# Altium footprint library LCD.PcbLib: 34 footprints (part 2 of 3)
Each footprint in its own frame and in the unit in brackets; x right, y up, seen from the top. Pads: shape width x height; smd on the part's side, far side on the other; paste and mask are expansions set on the pad; w line width, h text height; cw(c..) or ccw(c..) is an arc to the next point about the centre after c.
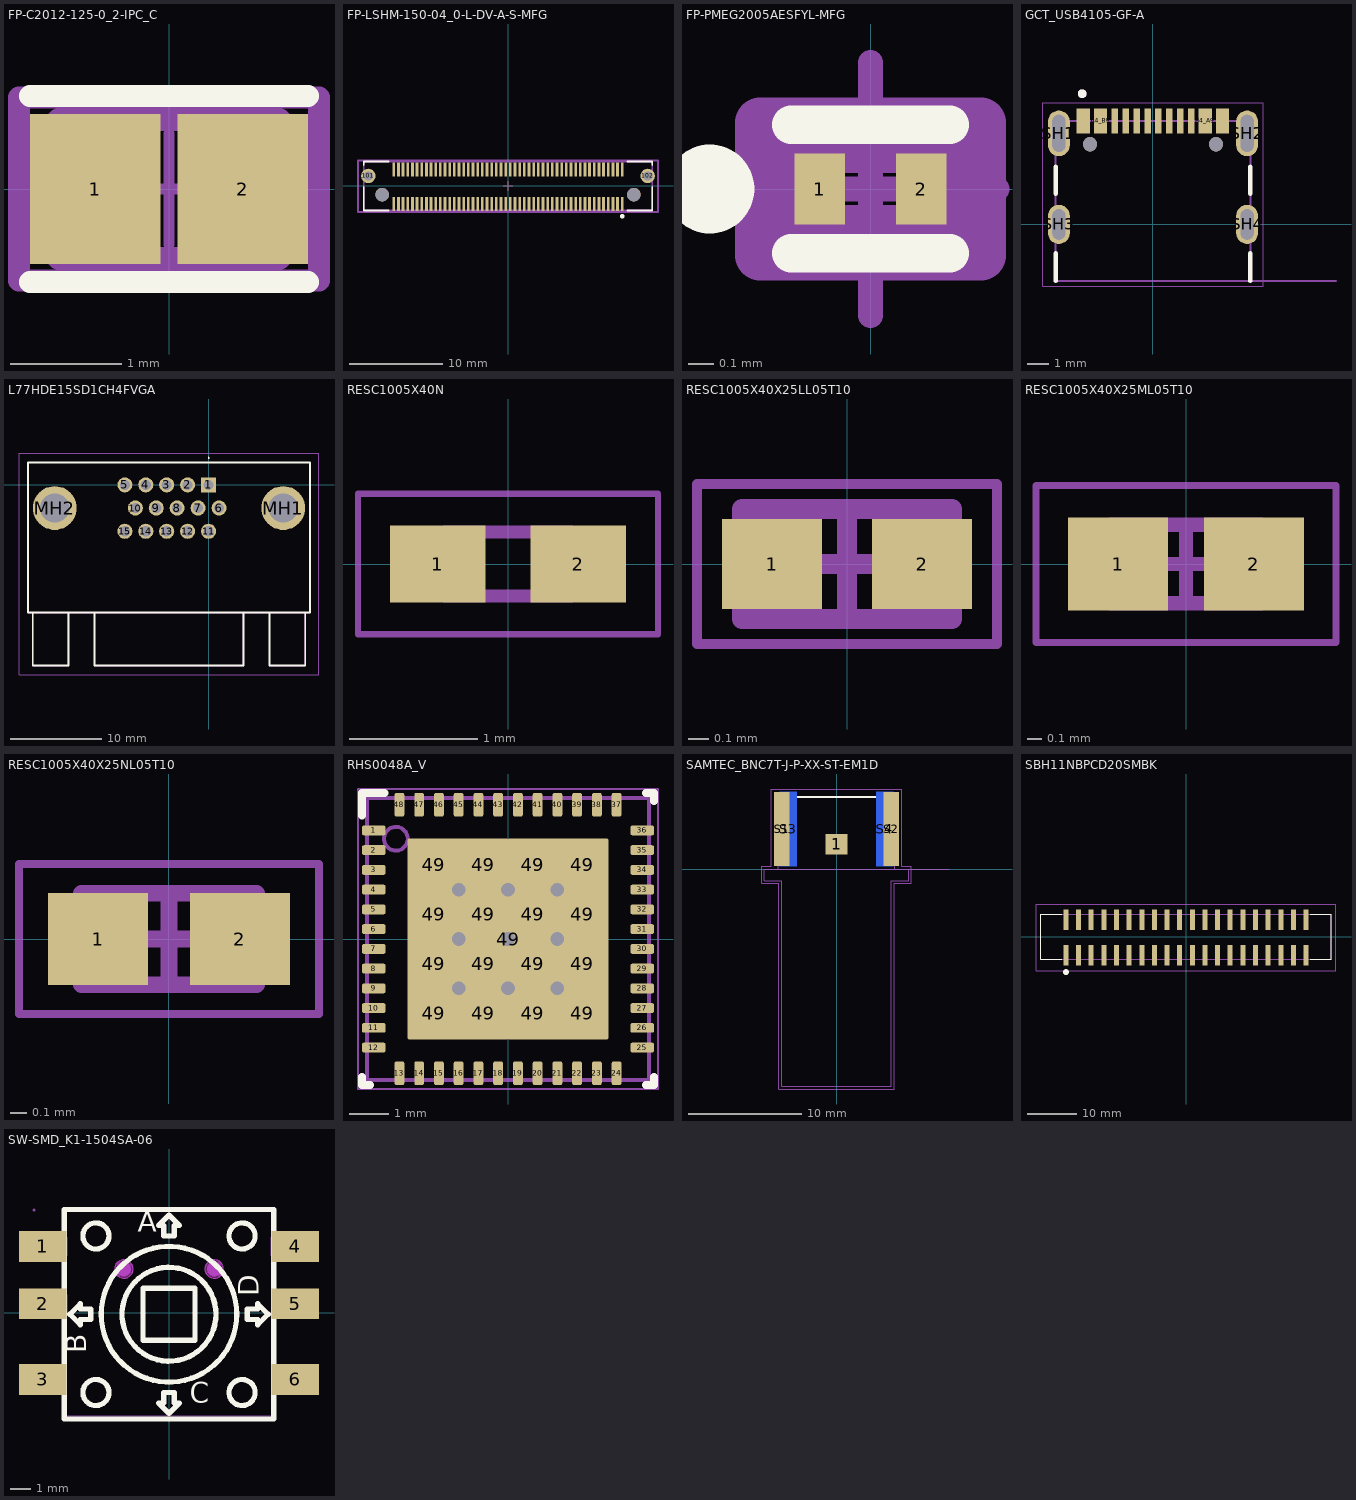
[diagram p1: the footprints below, top view; thin cyan lines are the x and y axes]

## FP-C2012-125-0_2-IPC_C [mm]
pads (2):
  rect 1.178x1.356 smd paste+0 mask+0: 1(-0.664,0) 2(0.664,0)
Top Overlay:
  lines w0.2: -1.253,-0.838 1.253,-0.838 ; -1.253,0.838 1.253,0.838
Top 3D Body:
  lines w0.2: -1,-0.625 1,-0.625 1,0.625 -1,0.625 -1,-0.625
Top Courtyard:
  lines w0.2: -1.353,-0.825 1.353,-0.825 1.353,0.825 -1.353,0.825 -1.353,-0.825
Top Assembly:
  lines w0.2: -1.353,-0.825 1.353,-0.825 1.353,0.825 -1.353,0.825 -1.353,-0.825
  text ".Designator" at 0,0.188 h1
Top Component Center:
  lines w0.1: -0.5,0 0.5,0 ; 0,-0.5 0,0.5
3D body "Cap_TDK_C2012X7R1E474K125AA_eec.STEP": height 0.25, standoff 0, extent -1.353,-0.825 1.353,0.825

## FP-LSHM-150-04_0-L-DV-A-S-MFG [mm]
pads (104):
  rect 0.3x1.5 smd paste+0 mask+0: 1(12.25,-1.925) 2(12.25,1.775) 3(11.75,-1.925) 4(11.75,1.775) 5(11.25,-1.925) 6(11.25,1.775) 7(10.75,-1.925) 8(10.75,1.775) 9(10.25,-1.925) 10(10.25,1.775) 11(9.75,-1.925) 12(9.75,1.775) 13(9.25,-1.925) 14(9.25,1.775) 15(8.75,-1.925) 16(8.75,1.775) 17(8.25,-1.925) 18(8.25,1.775) 19(7.75,-1.925) 20(7.75,1.775) 21(7.25,-1.925) 22(7.25,1.775) 23(6.75,-1.925) 24(6.75,1.775) 25(6.25,-1.925) 26(6.25,1.775) 27(5.75,-1.925) 28(5.75,1.775) 29(5.25,-1.925) 30(5.25,1.775) 31(4.75,-1.925) 32(4.75,1.775) 33(4.25,-1.925) 34(4.25,1.775) 35(3.75,-1.925) 36(3.75,1.775) 37(3.25,-1.925) 38(3.25,1.775) 39(2.75,-1.925) 40(2.75,1.775) 41(2.25,-1.925) 42(2.25,1.775) 43(1.75,-1.925) 44(1.75,1.775) 45(1.25,-1.925) 46(1.25,1.775) 47(0.75,-1.925) 48(0.75,1.775) 49(0.25,-1.925) 50(0.25,1.775) 51(-0.25,-1.925) 52(-0.25,1.775) 53(-0.75,-1.925) 54(-0.75,1.775) 55(-1.25,-1.925) 56(-1.25,1.775) 57(-1.75,-1.925) 58(-1.75,1.775) 59(-2.25,-1.925) 60(-2.25,1.775) 61(-2.75,-1.925) 62(-2.75,1.775) 63(-3.25,-1.925) 64(-3.25,1.775) 65(-3.75,-1.925) 66(-3.75,1.775) 67(-4.25,-1.925) 68(-4.25,1.775) 69(-4.75,-1.925) 70(-4.75,1.775) 71(-5.25,-1.925) 72(-5.25,1.775) 73(-5.75,-1.925) 74(-5.75,1.775) 75(-6.25,-1.925) 76(-6.25,1.775) 77(-6.75,-1.925) 78(-6.75,1.775) 79(-7.25,-1.925) 80(-7.25,1.775) 81(-7.75,-1.925) 82(-7.75,1.775) 83(-8.25,-1.925) 84(-8.25,1.775) 85(-8.75,-1.925) 86(-8.75,1.775) 87(-9.25,-1.925) 88(-9.25,1.775) 89(-9.75,-1.925) 90(-9.75,1.775) 91(-10.25,-1.925) 92(-10.25,1.775) 93(-10.75,-1.925) 94(-10.75,1.775) 95(-11.25,-1.925) 96(-11.25,1.775) 97(-11.75,-1.925) 98(-11.75,1.775) 99(-12.25,-1.925) 100(-12.25,1.775)
  round 1.55 hole 1 paste-2539.97 mask+0: 101(-14.975,1.075) 102(14.975,1.075)
  round 1.45 hole 1.45 unplated paste-2539.97 mask+0: ""(-13.5,-0.925) ""(13.5,-0.925)
Top Overlay:
  circle w0.25: c12.25,-3.25 r0.125
  lines w0.2: -15.465,-0.075 -15.465,-2.63 -12.775,-2.63 ; -15.465,2.225 -15.465,2.63 -12.775,2.63 ; 12.775,-2.63 15.465,-2.63 15.465,-0.075 ; 12.775,2.63 15.465,2.63 15.465,2.225
Top Paste:
  circle w1: c14.975,1.075 r0.5
  circle w1: c-14.975,1.075 r0.5
Top 3D Body:
  lines w0.2: -15.465,-2.63 15.465,-2.63 15.465,2.63 -15.465,2.63 -15.465,-2.63
Top Courtyard:
  lines w0.2: -16.075,-2.775 16.075,-2.775 16.075,2.73 -16.075,2.73 -16.075,-2.775
Top Assembly:
  lines w0.2: -16.075,-2.775 16.075,-2.775 16.075,2.73 -16.075,2.73 -16.075,-2.775
  text ".Designator" at 0.482,1.112 h1
Top Component Center:
  lines w0.1: -0.5,0 0.5,0 ; 0,-0.5 0,0.5
3D body "Conn_Samtec_LSHM-150-04_0-L-DV-A-S-K-TR_eec.STEP": height 0.25, standoff 0, extent -16.075,-2.775 16.075,2.73

## FP-PMEG2005AESFYL-MFG [mm]
pads (2):
  rect 0.2x0.28 smd paste-1000 mask-1000: 1(-0.2,0) 2(0.2,0)
Top Overlay:
  circle w0.25: c-0.635,0 r0.051
  lines w0.152: -0.312,-0.254 0.312,-0.254 ; -0.312,0.254 0.312,0.254
Top Paste:
  circle w0.128: c-0.208,0 r0.064
  circle w0.128: c0.208,0 r0.064
Top Solder:
  rectangle: -0.336,-0.14 -0.08,0.14
  rectangle: 0.08,-0.14 0.336,0.14
Top 3D Body:
  lines w0.2: -0.312,-0.162 0.312,-0.162 0.312,0.162 -0.312,0.162 -0.312,-0.162
Top Courtyard:
  lines w0.2: -0.436,-0.262 0.436,-0.262 0.436,0.262 -0.436,0.262 -0.436,-0.262
Top Assembly:
  lines w0.2: -0.436,-0.262 0.436,-0.262 0.436,0.262 -0.436,0.262 -0.436,-0.262
  text ".Designator" at 0.834,-0.004 h1
Top Component Center:
  lines w0.1: -0.5,0 0.5,0 ; 0,-0.5 0,0.5
3D body "Diode_Nexperia_PMEG2005AESFYL_eec.STEP": height 0.35, standoff 0, extent -0.3,-0.15 0.3,0.15

## GCT_USB4105-GF-A [mm]
height 3.31
pads (18):
  rect 0.6x1.15 smd mask+0.05: A1_B12(-3.2,4.755) A4_B9(-2.4,4.755) B1_A12(3.2,4.755) B4_A9(2.4,4.755)
  rect 0.3x1.15 smd mask+0.05: A5(-1.25,4.755) A6(-0.25,4.755) A7(0.25,4.755) A8(1.25,4.755) B5(1.75,4.755) B6(0.75,4.755) B7(-0.75,4.755) B8(-1.75,4.755)
  oval 1x2.1 hole 0.6 slot 1.7 at 90 deg: SH1(-4.32,4.18) SH2(4.32,4.18)
  oval 1x1.8 hole 0.6 slot 1.4 at 90 deg: SH3(-4.32,0) SH4(4.32,0)
  round 0.65 hole 0.65 unplated: ""(-2.89,3.68) ""(2.89,3.68)
Top Overlay:
  circle w0.2: c-3.25,6 r0.1
  lines w0.2: -4.47,-2.6 -4.47,-1.32 ; -4.47,1.4 -4.47,2.65 ; 4.47,-2.6 4.47,-1.32 ; 4.47,1.4 4.47,2.65
Mechanical 13:
  circle w0.2: c-3.25,6 r0.1
  lines w0.1: 8.4,-2.6 4.47,-2.6 ; 4.47,-2.6 -4.47,-2.6 -4.47,4.75 4.47,4.75 4.47,-2.6
  text "PCB EDGE" at 5.4,-2.5 h0.41
Mechanical 15:
  lines w0.05: -5.07,-2.85 5.07,-2.85 5.07,5.58 -5.07,5.58 -5.07,-2.85
3D body "USB4105-GF-A.STEP": height 3.31, standoff -1.1, extent -4.47,-2.473 4.47,5.237

## L77HDE15SD1CH4FVGA [mm]
height 15.7
pads (17):
  rect 1.65x1.65 hole 1.1: 1(0,0)
  round 1.65 hole 1.1: 2(-2.29,0) 3(-4.58,0) 4(-6.87,0) 5(-9.16,0) 6(1.145,-2.54) 7(-1.145,-2.54) 8(-3.435,-2.54) 9(-5.725,-2.54) 10(-8.015,-2.54) 11(0,-5.08) 12(-2.29,-5.08) 13(-4.58,-5.08) 14(-6.87,-5.08) 15(-9.16,-5.08)
  round 4.8 hole 3.2: MH1(8.165,-2.54) MH2(-16.825,-2.54)
Top Overlay:
  lines w0.1: 0,2.9 ccw(c0,2.95) 0,3 ccw(c0,2.95) 0,2.9
  lines w0.2: -19.235,-13.97 -19.235,-19.77 -15.335,-19.77 -15.335,-13.97 ; -12.46,-13.97 -12.46,-19.77 3.8,-19.77 3.8,-13.97 ; 6.675,-13.97 6.675,-19.77 10.575,-19.77 10.575,-13.97 ; -19.735,-13.97 -19.735,2.45 11.075,2.45 11.075,-13.97 -19.735,-13.97
Mechanical 13:
  lines w0.1: -19.235,-13.97 -19.235,-19.77 -15.335,-19.77 -15.335,-13.97 ; -12.46,-13.97 -12.46,-19.77 3.8,-19.77 3.8,-13.97 ; 6.675,-13.97 6.675,-19.77 10.575,-19.77 10.575,-13.97 ; -19.735,-13.97 -19.735,2.45 11.075,2.45 11.075,-13.97 -19.735,-13.97
Mechanical 15:
  lines w0.1: -20.735,-20.77 -20.735,3.45 12.075,3.45 12.075,-20.77 -20.735,-20.77
3D body "L77HDE15SD1CH4FVGA.stp": height 12.47, standoff -3.87, extent -19.735,-19.89 11.075,2.21

## PCBComponent_1 [mm]

## PCBComponent_1 - duplicate [mm]

## PCBComponent_1 - duplicate - duplicate [mm]

## RESC1005X40N [mm]
pads (2):
  rect 0.75x0.6 smd: 1(-0.55,0) 2(0.55,0)
Mechanical 13:
  lines w0.1: -0.5,-0.25 0.5,-0.25 0.5,0.25 -0.5,0.25 -0.5,-0.25
Mechanical 15:
  lines w0.05: -1.175,-0.55 1.175,-0.55 1.175,0.55 -1.175,0.55 -1.175,-0.55
3D body "RC0402FR-07330RL.stp": height 0.4, standoff 0, extent -0.5,-0.25 0.5,0.25

## RESC1005X40X25LL05T10 [mm] "Chip Resistor, 2-Leads, Body 1.00x0.50mm, IPC High Density"
height 0.4
pads (2):
  rect 0.5x0.45 smd: 1(-0.375,0) 2(0.375,0)
Top 3D Body:
  lines w0.1: -0.525,-0.275 0.525,-0.275 0.525,0.275 -0.525,0.275 -0.525,-0.275
Top Courtyard:
  lines w0.05: -0.75,-0.4 0.75,-0.4 0.75,0.4 -0.75,0.4 -0.75,-0.4
  lines w0.1: -0.275,0 0.275,0 ; 0,-0.275 0,0.275
3D body: height 0.4, standoff 0, extent 0.275,-0.275 0.525,0.275
3D body: height 0.4, standoff 0, extent -0.525,-0.275 -0.275,0.275
3D body: height 0.4, standoff 0, extent -0.275,-0.275 0.275,0.275

## RESC1005X40X25ML05T10 [mm] "Chip Resistor, 2-Leads, Body 1.00x0.50mm, IPC Low Density"
height 0.4
pads (2):
  rect 0.7x0.65 smd: 1(-0.475,0) 2(0.475,0)
Top 3D Body:
  lines w0.1: -0.525,-0.275 -0.525,0.275 0.525,0.275 0.525,-0.275 -0.525,-0.275
Top Courtyard:
  lines w0.05: -1.05,-0.55 -1.05,0.55 1.05,0.55 1.05,-0.55 -1.05,-0.55
  lines w0.1: -0.275,0 0.275,0 ; 0,-0.275 0,0.275
3D body: height 0.4, standoff 0, extent -0.275,-0.275 0.275,0.275
3D body: height 0.4, standoff 0, extent -0.525,-0.275 -0.275,0.275
3D body: height 0.4, standoff 0, extent 0.275,-0.275 0.525,0.275

## RESC1005X40X25NL05T10 [mm] "Chip Resistor, 2-Leads, Body 1.00x0.50mm, IPC Medium Density"
height 0.4
pads (2):
  rect 0.6x0.55 smd: 1(-0.425,0) 2(0.425,0)
Top 3D Body:
  lines w0.1: -0.525,-0.275 0.525,-0.275 0.525,0.275 -0.525,0.275 -0.525,-0.275
Top Courtyard:
  lines w0.05: -0.9,-0.45 0.9,-0.45 0.9,0.45 -0.9,0.45 -0.9,-0.45
  lines w0.1: -0.275,0 0.275,0 ; 0,-0.275 0,0.275
3D body: height 0.4, standoff 0, extent 0.275,-0.275 0.525,0.275
3D body: height 0.4, standoff 0, extent -0.525,-0.275 -0.275,0.275
3D body: height 0.4, standoff 0, extent -0.275,-0.275 0.275,0.275

## RHS0048A_V [mm] "QFN, 48-Leads, Body 7x7mm, Pitch 0.5mm, TI Recommended"
height 0.8
pads (65):
  rrect40% 0.6x0.25 smd: 1(-3.4,2.75) 2(-3.4,2.25) 3(-3.4,1.75) 4(-3.4,1.25) 5(-3.4,0.75) 6(-3.4,0.25) 7(-3.4,-0.25) 8(-3.4,-0.75) 9(-3.4,-1.25) 10(-3.4,-1.75) 11(-3.4,-2.25) 12(-3.4,-2.75) 25(3.4,-2.75) 26(3.4,-2.25) 27(3.4,-1.75) 28(3.4,-1.25) 29(3.4,-0.75) 30(3.4,-0.25) 31(3.4,0.25) 32(3.4,0.75) 33(3.4,1.25) 34(3.4,1.75) 35(3.4,2.25) 36(3.4,2.75)
  rrect40% 0.25x0.6 smd: 13(-2.75,-3.4) 14(-2.25,-3.4) 15(-1.75,-3.4) 16(-1.25,-3.4) 17(-0.75,-3.4) 18(-0.25,-3.4) 19(0.25,-3.4) 20(0.75,-3.4) 21(1.25,-3.4) 22(1.75,-3.4) 23(2.25,-3.4) 24(2.75,-3.4) 37(2.75,3.4) 38(2.25,3.4) 39(1.75,3.4) 40(1.25,3.4) 41(0.75,3.4) 42(0.25,3.4) 43(-0.25,3.4) 44(-0.75,3.4) 45(-1.25,3.4) 46(-1.75,3.4) 47(-2.25,3.4) 48(-2.75,3.4)
  rrect10% 1.05x1.05 on Top Paste: 49(-1.875,-1.875) 49(-1.875,-0.625) 49(-1.875,0.625) 49(-1.875,1.875) 49(-0.625,-1.875) 49(-0.625,-0.625) 49(-0.625,0.625) 49(-0.625,1.875) 49(0.625,-1.875) 49(0.625,-0.625) 49(0.625,0.625) 49(0.625,1.875) 49(1.875,-1.875) 49(1.875,-0.625) 49(1.875,0.625) 49(1.875,1.875)
  rrect2% 5.1x5.1 smd paste-2.55: 49(0,0)
via 0,0 diameter 0.7 hole 0.35
via 1.25,0 diameter 0.7 hole 0.35
via -1.25,0 diameter 0.7 hole 0.35
via -1.25,1.25 diameter 0.7 hole 0.35
via 1.25,1.25 diameter 0.7 hole 0.35
via 0,1.25 diameter 0.7 hole 0.35
via 0,-1.25 diameter 0.7 hole 0.35
via 1.25,-1.25 diameter 0.7 hole 0.35
via -1.25,-1.25 diameter 0.7 hole 0.35
Top Overlay:
  lines w0.2: -3.7,-3.5 -3.7,-3.7 -3.5,-3.7 ; -3.7,3.125 -3.7,3.7 -3.125,3.7 ; 3.5,-3.7 3.7,-3.7 3.7,-3.5 ; 3.5,3.7 3.7,3.7 3.7,3.5
Mechanical 1:
  text ".Designator" at -1.9,-0.5 h1.02
Top 3D Body:
  circle w0.1: c-2.84,2.54 r0.3
  lines w0.1: -3.575,-3.575 3.575,-3.575 3.575,3.575 -3.575,3.575 -3.575,-3.575
Top Courtyard:
  lines w0.05: -3.8,-3.8 3.8,-3.8 3.8,3.8 -3.8,3.8 -3.8,-3.8
  lines w0.1: -0.5,0 0.5,0 ; 0,-0.5 0,0.5
3D body: height 0.8, standoff 0, extent -3.574,-3.574 3.574,3.574
3D body: height 0.81, standoff 0.5, extent -3.139,2.241 -2.541,2.839

## SAMTEC_BNC7T-J-P-XX-ST-EM1D [mm]
pads (5):
  rect 1.98x1.83 smd: 1(0,2.185)
  rect 1.35x6.55 smd: S1(-4.825,3.525) S2(4.825,3.525)
  rect 1.5x6.55 smd far side: S3(-4.25,3.525) S4(4.25,3.525)
Top Overlay:
  lines w0.2: -3.8,6.35 3.8,6.35
Mechanical 13:
  lines w0.1: 9.95,0 6.35,0 ; -5.15,0 -5.15,6.35 5.15,6.35 5.15,0 ; -5.15,0 -6.35,0 -6.35,-1.02 -4.825,-1.02 -4.825,-19.13 4.825,-19.13 4.825,-1.02 6.35,-1.02 6.35,0 ; -5.15,0 5.15,0 ; 5.15,0 6.35,0
  text "PCB Edge" at 6.25,0.25 h1.27
Mechanical 15:
  lines w0.05: -6.6,-1.27 -6.6,0.25 -5.75,0.25 -5.75,7.05 5.75,7.05 5.75,0.25 6.6,0.25 6.6,-1.27 5.075,-1.27 5.075,-19.38 -5.075,-19.38 -5.075,-1.27 -6.6,-1.27
3D body "BNC7T-J-P-GN-ST-EM1D.stp": height 8.63, standoff -7.36, extent -7.994,-19.13 7.994,6.35

## SBH11NBPCD20SMBK [mm]
pads (40):
  rect 1x4.15 smd: 1(-24.13,-3.725) 2(-24.13,3.425) 3(-21.59,-3.725) 4(-21.59,3.425) 5(-19.05,-3.725) 6(-19.05,3.425) 7(-16.51,-3.725) 8(-16.51,3.425) 9(-13.97,-3.725) 10(-13.97,3.425) 11(-11.43,-3.725) 12(-11.43,3.425) 13(-8.89,-3.725) 14(-8.89,3.425) 15(-6.35,-3.725) 16(-6.35,3.425) 17(-3.81,-3.725) 18(-3.81,3.425) 19(-1.27,-3.725) 20(-1.27,3.425) 21(1.27,-3.725) 22(1.27,3.425) 23(3.81,-3.725) 24(3.81,3.425) 25(6.35,-3.725) 26(6.35,3.425) 27(8.89,-3.725) 28(8.89,3.425) 29(11.43,-3.725) 30(11.43,3.425) 31(13.97,-3.725) 32(13.97,3.425) 33(16.51,-3.725) 34(16.51,3.425) 35(19.05,-3.725) 36(19.05,3.425) 37(21.59,-3.725) 38(21.59,3.425) 39(24.13,-3.725) 40(24.13,3.425)
Top Overlay:
  circle w0.6: c-24.13,-7.112 r0.3
  lines w0.2: -25,-4.55 -29.15,-4.55 -29.15,4.55 -25,4.55 ; 25,-4.55 29.15,-4.55 29.15,4.55 25,4.55
Mechanical 13:
  lines w0.1: -29.15,-4.55 -29.15,4.55 29.15,4.55 29.15,-4.55 -29.15,-4.55
Mechanical 15:
  lines w0.1: -30.15,-6.8 -30.15,6.5 30.15,6.5 30.15,-6.8 -30.15,-6.8
3D body "HTST-120-01-L-DV.stp": height 10.16, standoff 0, extent -29.21,-5.588 29.21,5.588

## SW-SMD_K1-1504SA-06 [mm]
pads (6):
  rect 2.3x1.5 smd: 1(-6.15,3.238) 2(-6.15,0.445) 3(-6.15,-3.238) 4(6.15,3.238) 5(6.15,0.445) 6(6.15,-3.238)
Top Overlay:
  circle w0.254: c0,-0.064 r2.286
  circle w0.254: c0,-0.064 r3.302
  circle w0.254: c3.556,-3.873 r0.635
  circle w0.254: c-3.556,-3.873 r0.635
  circle w0.254: c3.556,3.746 r0.635
  circle w0.254: c-3.556,3.746 r0.635
  lines w0.254: -5.1,-5.164 5.1,-5.164 5.1,5.037 -5.1,5.037 -5.1,-5.164 ; -4.826,-0.064 -4.318,0.445 -4.318,0.191 -3.81,0.191 -3.81,-0.318 -4.318,-0.318 -4.318,-0.572 -4.826,-0.064 ; -1.27,-1.333 -1.27,1.206 1.27,1.206 1.27,-1.333 -1.27,-1.333 ; -0.508,-4.381 0,-4.889 0.508,-4.381 0.254,-4.381 0.254,-3.873 -0.254,-3.873 -0.254,-4.381 -0.508,-4.381 ; -0.508,4.255 -0.254,4.255 -0.254,3.746 0.254,3.746 0.254,4.255 0.508,4.255 0,4.763 -0.508,4.255 ; 3.81,-0.318 4.318,-0.318 4.318,-0.572 4.826,-0.064 4.318,0.445 4.318,0.191 3.81,0.191 3.81,-0.318
  text "D" at 4.356,0.823 h1
  text "C" at 1.016,-4.381 h1
  text "B" at -4.026,-1.971 h1
  text "A" at -1.524,3.962 h1
Keep-Out Layer:
  board cut-out: 2.65,2.136 2.65,2.047 2.581,1.881 2.454,1.755 2.289,1.686 2.11,1.686 1.945,1.755 1.818,1.881 1.75,2.047 1.75,2.136 1.75,2.226 1.818,2.391 1.945,2.518 2.11,2.586 2.289,2.586 2.454,2.518 2.581,2.391 2.65,2.226
  board cut-out: -1.75,2.136 -1.75,2.047 -1.818,1.881 -1.945,1.755 -2.11,1.686 -2.289,1.686 -2.455,1.755 -2.581,1.881 -2.65,2.047 -2.65,2.136 -2.65,2.226 -2.581,2.391 -2.455,2.518 -2.289,2.586 -2.11,2.586 -1.945,2.518 -1.818,2.391 -1.75,2.226
Keep-Out Layer:
  circle w0.025: c2.2,2.136 r0.45
  circle w0.025: c-2.2,2.136 r0.45
  region: 2.65,2.136 2.65,2.047 2.581,1.881 2.454,1.755 2.289,1.686 2.11,1.686 1.945,1.755 1.818,1.881 1.75,2.047 1.75,2.136 1.75,2.226 1.818,2.391 1.945,2.518 2.11,2.586 2.289,2.586 2.454,2.518 2.581,2.391 2.65,2.226
  region: -1.75,2.136 -1.75,2.047 -1.818,1.881 -1.945,1.755 -2.11,1.686 -2.289,1.686 -2.455,1.755 -2.581,1.881 -2.65,2.047 -2.65,2.136 -2.65,2.226 -2.581,2.391 -2.455,2.518 -2.289,2.586 -2.11,2.586 -1.945,2.518 -1.818,2.391 -1.75,2.226
Mechanical 1:
  circle w0.025: c2.2,2.136 r0.45
  circle w0.025: c-2.2,2.136 r0.45
Mechanical 6:
  circle w0.5: c-6.096,3.048 r0.25
Mechanical 15:
  region: 4.966,-2.783 4.966,-3.685 4.96,-3.692 6.554,-3.692 6.557,-3.695 6.557,-2.798 6.544,-2.784 6.391,-2.784 6.341,-2.781
  region: 4.968,0.899 4.968,-0.004 4.961,-0.011 6.555,-0.011 6.559,-0.014 6.559,0.883 6.545,0.897 6.393,0.897 6.342,0.9
  region: 4.959,3.694 4.959,2.792 4.952,2.785 6.546,2.785 6.55,2.781 6.55,3.679 6.536,3.692 6.384,3.692 6.333,3.696
  region: -6.556,-2.784 -6.556,-3.686 -6.563,-3.693 -4.969,-3.693 -4.965,-3.696 -4.965,-2.799 -4.979,-2.785 -5.131,-2.785 -5.182,-2.782
  region: -6.544,0.895 -6.544,-0.008 -6.551,-0.014 -4.957,-0.014 -4.953,-0.018 -4.953,0.88 -4.967,0.893 -5.119,0.893 -5.17,0.897
  region: -6.552,3.696 -6.552,2.794 -6.559,2.787 -4.965,2.787 -4.961,2.784 -4.961,3.681 -4.975,3.695 -5.127,3.695 -5.178,3.698
  region: 5.048,3.689 6.548,3.689 6.548,2.788 5.048,2.788
  region: 5.048,0.895 6.548,0.895 6.548,-0.006 5.048,-0.006
  region: 6.548,-3.689 5.048,-3.689 5.048,-2.788 6.548,-2.788
  region: -5.048,-3.689 -6.548,-3.689 -6.548,-2.788 -5.048,-2.788
  region: -5.048,-0.006 -6.548,-0.006 -6.548,0.895 -5.048,0.895
  region: -5.048,2.788 -6.548,2.788 -6.548,3.689 -5.048,3.689
  region: 2.55,2.136 2.55,2.067 2.496,1.938 2.398,1.839 2.269,1.786 2.13,1.786 2.001,1.839 1.903,1.938 1.85,2.067 1.85,2.136 1.85,2.206 1.903,2.334 2.001,2.433 2.13,2.486 2.269,2.486 2.398,2.433 2.496,2.334 2.55,2.206
  region: -1.85,2.136 -1.85,2.067 -1.903,1.938 -2.001,1.839 -2.13,1.786 -2.269,1.786 -2.398,1.839 -2.496,1.938 -2.55,2.067 -2.55,2.136 -2.55,2.206 -2.496,2.334 -2.398,2.433 -2.269,2.486 -2.13,2.486 -2.001,2.433 -1.903,2.334 -1.85,2.206
  region: -6.503,5 -6.503,4.975 -6.538,4.94 -6.588,4.94 -6.623,4.975 -6.623,5 -6.623,5.025 -6.588,5.06 -6.538,5.06 -6.503,5.025
  lines w0.051: -5,-5 5,-5 5,5 -5,5 -5,-5
3D body "joystick.STEP": height 9.7, standoff 0, extent -7.862,-5.234 7.838,5.266